# Altium schematic symbol library 核心板.SCHLIB: 1 symbol
Pins are listed as number, name and electrical type; pins without a type are passive.

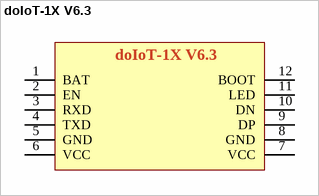
[diagram p0: symbol doIoT-1X V6.3]

## doIoT-1X V6.3
designator P?  (value not drawn)
footprint doIoT-1X V6.3 (Footprint not found)
pins: 1 BAT (power), 2 EN (power), 3 RXD (power), 4 TXD, 5 GND (power), 6 VCC (power), 7 VCC (power), 8 GND (power), 9 DP (power), 10 DN (power), 11 LED (power), 12 BOOT (power)